# Altium schematic symbol library SnakeCardNative.SchLib: 29 symbols
Pins are listed as number, name and electrical type; pins without a type are passive.

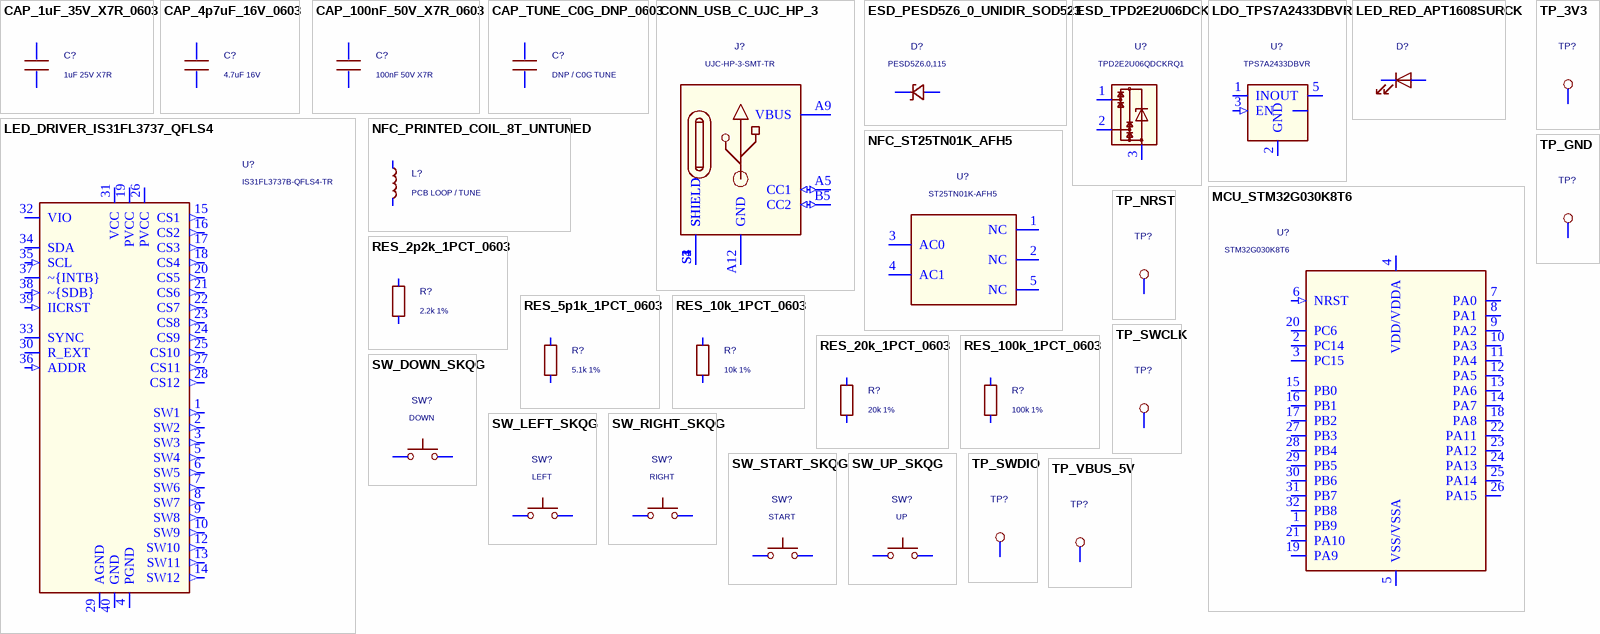
[diagram p0: symbols CAP_1uF_35V_X7R_0603 to TP_VBUS_5V]

## CAP_1uF_35V_X7R_0603
designator C?, comment 1uF 25V X7R
1 uF; 25 V; X7R; 0603; Manufacturer: Samsung Electro-Mechanics; Manufacturer_Part_Number: CL10B105KA8NNNC; Source_Footprint: Capacitor_SMD:C_0603_1608Metric; Assembly_Variant: SC-REVC-LCSC-P1; Assembly_Status: Prototype qualification pending; Fitted: Yes; Source_Datasheet: https://product.samsungsem.com/mlcc/CL10B105KA8NNN.do; Supplier: LCSC; Supplier_Part_Number: C29936; Datasheet: https://product.samsungsem.com/mlcc/CL10B105KA8NNN.do
footprint C_0603_1608Metric (Paid DIY board footprint; physical pads checked)
pins: 1, 2

## CAP_4p7uF_16V_0603
designator C?, comment 4.7uF 16V
4.7 uF; 16 V; 0603; ceramic; Manufacturer: Murata; Manufacturer_Part_Number: GRM188Z71C475KE21D; Source_Footprint: Capacitor_SMD:C_0603_1608Metric; Assembly_Variant: SC-REVC-LCSC-P1; Assembly_Status: Prototype qualification pending; Fitted: Yes; Source_Datasheet: https://search.murata.co.jp/Ceramy/image/img/A01X/G101/ENG/GRM188Z71C475KE21-01A.pdf; Supplier: LCSC; Supplier_Part_Number: C389010; Datasheet: https://search.murata.co.jp/Ceramy/image/img/A01X/G101/ENG/GRM188Z71C475KE21-01A.pdf
footprint C_0603_1608Metric (Paid DIY board footprint; physical pads checked)
pins: 1, 2

## CAP_100nF_50V_X7R_0603
designator C?, comment 100nF 50V X7R
100 nF; 50 V; X7R; 0603; Manufacturer: Yageo; Manufacturer_Part_Number: CC0603KRX7R9BB104; Source_Footprint: Capacitor_SMD:C_0603_1608Metric; Assembly_Variant: SC-REVC-LCSC-P1; Assembly_Status: Prototype qualification pending; Fitted: Yes; Source_Datasheet: https://yageogroup.com/download/specsheet/CC0603KRX7R9BB104; Supplier: LCSC; Supplier_Part_Number: C14663; Datasheet: https://yageogroup.com/download/specsheet/CC0603KRX7R9BB104
footprint C_0603_1608Metric (Paid DIY board footprint; physical pads checked)
pins: 1, 2

## CAP_TUNE_C0G_DNP_0603
designator C?, comment DNP / C0G TUNE
Source_Footprint: Capacitor_SMD:C_0603_1608Metric; Assembly: DNP; Assembly_Variant: SC-REVC-LCSC-P1; Assembly_Status: DNP pending RF tuning; Fitted: No; DNP_Reason: NFC tuning; no approved value
footprint C_0603_1608Metric__DNP_NOPASTE (Paid DIY board footprint; physical pads checked)
pins: 1, 2

## CONN_USB_C_UJC_HP_3
designator J?, comment UJC-HP-3-SMT-TR
USB-C power-only receptacle; 0.8 mm PCB; Manufacturer: Same Sky; Source_Footprint: SnakeCard:CUI_UJC-HP-3-SMT-TR; Assembly_Variant: SC-REVC-LCSC-P1; Assembly_Status: Prototype qualification pending; Fitted: Yes; Source_Datasheet: https://www.sameskydevices.com/product/resource/ujc-hp-3-smt-tr.pdf; Manufacturer_Part_Number: UJC-HP-3-SMT-TR; Supplier: LCSC; Supplier_Part_Number: C3198015; Datasheet: https://www.sameskydevices.com/product/resource/ujc-hp-3-smt-tr.pdf
footprint CUI_UJC-HP-3-SMT-TR (Paid DIY board footprint; physical pads checked)
pins: A5 CC1 (io), A9 VBUS, A12 GND, B5 CC2 (io), B9 VBUS, B12 GND, S1 SHIELD, S2 SHIELD, S3 SHIELD, S4 SHIELD

## ESD_PESD5Z6_0_UNIDIR_SOD523
designator D?, comment PESD5Z6.0,115
6 V unidirectional TVS; SOD523; Manufacturer: Nexperia; Source_Footprint: Diode_SMD:D_SOD-523; Assembly_Variant: SC-REVC-LCSC-P1; Assembly_Status: Prototype qualification pending; Fitted: Yes; Source_Datasheet: https://assets.nexperia.com/documents/data-sheet/PESD5Z6_0.pdf; Manufacturer_Part_Number: PESD5Z6.0,115; Supplier: LCSC; Supplier_Part_Number: C461166; Datasheet: https://assets.nexperia.com/documents/data-sheet/PESD5Z6_0.pdf
footprint D_SOD-523 (Paid DIY board footprint; physical pads checked)
pins: 1 K, 2 A

## ESD_TPD2E2U06DCK
designator U?, comment TPD2E2U06QDCKRQ1
Dual CC-line ESD protection; DCK SC70-3; Manufacturer: Texas Instruments; Source_Footprint: Package_TO_SOT_SMD:SOT-323_SC-70; Assembly_Variant: SC-REVC-LCSC-P1; Assembly_Status: Prototype qualification pending; Fitted: Yes; Source_Datasheet: https://www.ti.com/lit/ds/symlink/tpd2e2u06-q1.pdf; Manufacturer_Part_Number: TPD2E2U06QDCKRQ1; Supplier: LCSC; Supplier_Part_Number: C915089; Datasheet: https://www.ti.com/lit/ds/symlink/tpd2e2u06-q1.pdf
footprint SOT-323_SC-70 (Paid DIY board footprint; physical pads checked)
pins: 1, 2, 3

## LDO_TPS7A2433DBVR
designator U?, comment TPS7A2433DBVR
3.3 V LDO; DBV SOT-23-5; 18 V operating input; Manufacturer: Texas Instruments; Source_Footprint: Package_TO_SOT_SMD:SOT-23-5; Assembly_Variant: SC-REVC-LCSC-P1; Assembly_Status: Prototype qualification pending; Fitted: Yes; Source_Datasheet: https://www.ti.com/lit/ds/symlink/tps7a24.pdf; Manufacturer_Part_Number: TPS7A2433DBVR; Supplier: LCSC; Supplier_Part_Number: C2866134; Datasheet: https://www.ti.com/lit/ds/symlink/tps7a24.pdf
footprint SOT-23-5 (Paid DIY board footprint; physical pads checked)
pins: 1 IN (power), 2 GND (power), 3 EN (in), 4 NC, 5 OUT (power)

## LED_DRIVER_IS31FL3737_QFLS4
designator U?, comment IS31FL3737B-QFLS4-TR
LED matrix driver; QFN-40 with exposed GND pad; Manufacturer: Lumissil / ISSI; Source_Footprint: SnakeCard:IS31FL3737_QFN40_5x5mm_P0.4mm_EP3.4mm; Assembly_Variant: SC-REVC-LCSC-P1; Assembly_Status: Prototype qualification pending; Fitted: Yes; Source_Datasheet: https://www.lumissil.com/assets/pdf/core/IS31FL3737B_DS.pdf; Manufacturer_Part_Number: IS31FL3737B-QFLS4-TR; Supplier: LCSC; Supplier_Part_Number: C2940515; Datasheet: https://www.lumissil.com/assets/pdf/core/IS31FL3737B_DS.pdf
footprint IS31FL3737_QFN40_5x5mm_P0.4mm_EP3.4mm (Paid DIY board footprint; physical pads checked)
pins: 1 SW1 (out), 2 SW2 (out), 3 SW3 (out), 4 PGND (power), 5 SW4 (out), 6 SW5 (out), 7 SW6 (out), 8 SW7 (out), 9 SW8 (out), 10 SW9 (out), 11 PGND, 12 SW10 (out), 13 SW11 (out), 14 SW12 (out), 15 CS1 (out), 16 CS2 (out), 17 CS3 (out), 18 CS4 (out), 19 PVCC (power), 20 CS5 (out), 21 CS6 (out), 22 CS7 (out), 23 CS8 (out), 24 CS9 (out), 25 CS10 (out), 26 PVCC (power), 27 CS11 (out), 28 CS12 (out), 29 AGND (power), 30 R_EXT, 31 VCC (power), 32 VIO (power), 33 SYNC (io), 34 SDA (io), 35 SCL (in), 36 ADDR (in), 37 ~{INTB} (oc), 38 ~{SDB} (in), 39 IICRST (in), 40 GND (power), 41 GND

## LED_RED_APT1608SURCK
designator D?, comment KT-0603R  (value not drawn)
Red 1608 LED; Manufacturer: Hubei KENTO; Source_Footprint: SnakeCard:Kingbright_APT1608SURCK; Assembly_Variant: SC-REVC-LCSC-P1; Assembly_Status: Prototype qualification pending; Fitted: Yes; Source_Datasheet: https://datasheet.lcsc.com/datasheet/pdf/011ec3e8cb1e825f6961d29bc4db4c7a.pdf; Manufacturer_Part_Number: KT-0603R; Supplier: LCSC; Supplier_Part_Number: C2286; Datasheet: https://datasheet.lcsc.com/datasheet/pdf/011ec3e8cb1e825f6961d29bc4db4c7a.pdf
footprint Kingbright_APT1608SURCK (Paid DIY board footprint; physical pads checked)
pins: 1 K, 2 A

## MCU_STM32G030K8T6
designator U?, comment STM32G030K8T6
STM32G0 MCU; LQFP-32; Manufacturer: STMicroelectronics; Source_Footprint: Package_QFP:LQFP-32_7x7mm_P0.8mm; Assembly_Variant: SC-REVC-LCSC-P1; Assembly_Status: Prototype qualification pending; Fitted: Yes; Source_Datasheet: https://www.st.com/resource/en/datasheet/stm32g030k8.pdf; Manufacturer_Part_Number: STM32G030K8T6; Supplier: LCSC; Supplier_Part_Number: C431631; Datasheet: https://www.st.com/resource/en/datasheet/stm32g030k8.pdf
footprint LQFP-32_7x7mm_P0.8mm (Paid DIY board footprint; physical pads checked)
pins: 1 PB9 (io), 2 PC14 (io), 3 PC15 (io), 4 VDD/VDDA (power), 5 VSS/VSSA (power), 6 NRST (in), 7 PA0 (io), 8 PA1 (io), 9 PA2 (io), 10 PA3 (io), 11 PA4 (io), 12 PA5 (io), 13 PA6 (io), 14 PA7 (io), 15 PB0 (io), 16 PB1 (io), 17 PB2 (io), 18 PA8 (io), 19 PA9 (io), 20 PC6 (io), 21 PA10 (io), 22 PA11 (io), 23 PA12 (io), 24 PA13 (io), 25 PA14 (io), 26 PA15 (io), 27 PB3 (io), 28 PB4 (io), 29 PB5 (io), 30 PB6 (io), 31 PB7 (io), 32 PB8 (io)

## NFC_PRINTED_COIL_8T_UNTUNED
designator L?, comment PCB LOOP / TUNE  (net tie, no BOM)
Assembly_Variant: SC-REVC-LCSC-P1; Assembly_Status: PCB feature; no purchased component; Fitted: No; DNP_Reason: Printed PCB feature; no purchased component
footprint NFC_PRINTED_COIL_8T_UNTUNED (Paid DIY board footprint; physical pads checked)
pins: 1, 2

## NFC_ST25TN01K_AFH5
designator U?, comment ST25TN01K-AFH5
Passive NFC tag; UFDFPN5; Manufacturer: STMicroelectronics; Source_Footprint: SnakeCard:ST25TN01K_UFDFPN5_1.7x1.4mm; Assembly_Variant: SC-REVC-LCSC-P1; Assembly_Status: Prototype qualification pending; Fitted: Yes; Source_Datasheet: https://www.st.com/resource/en/datasheet/st25tn01k.pdf; Manufacturer_Part_Number: ST25TN01K-AFH5; Supplier: LCSC; Supplier_Part_Number: C3303589; Datasheet: https://www.st.com/resource/en/datasheet/st25tn01k.pdf
footprint ST25TN01K_UFDFPN5_1.7x1.4mm (Paid DIY board footprint; physical pads checked)
pins: 1 NC, 2 NC, 3 AC0, 4 AC1, 5 NC

## RES_2p2k_1PCT_0603
designator R?, comment 2.2k 1%
2.2 kohm; 1%; 0603; Manufacturer: Panasonic; Manufacturer_Part_Number: ERJ3EKF2201V; Source_Footprint: Resistor_SMD:R_0603_1608Metric; Assembly_Variant: SC-REVC-LCSC-P1; Assembly_Status: Prototype qualification pending; Fitted: Yes; Source_Datasheet: https://industrial.panasonic.com/cdbs/www-data/pdf/RDA0000/AOA0000C304.pdf; Supplier: LCSC; Supplier_Part_Number: C116387; Datasheet: https://industrial.panasonic.com/cdbs/www-data/pdf/RDA0000/AOA0000C304.pdf
footprint R_0603_1608Metric (Paid DIY board footprint; physical pads checked)
pins: 1, 2

## RES_5p1k_1PCT_0603
designator R?, comment 5.1k 1%
5.1 kohm; 1%; 0603; Manufacturer: Panasonic; Manufacturer_Part_Number: ERJ3EKF5101V; Source_Footprint: Resistor_SMD:R_0603_1608Metric; Assembly_Variant: SC-REVC-LCSC-P1; Assembly_Status: Prototype qualification pending; Fitted: Yes; Source_Datasheet: https://industrial.panasonic.com/cdbs/www-data/pdf/RDA0000/AOA0000C304.pdf; Supplier: LCSC; Supplier_Part_Number: C123727; Datasheet: https://industrial.panasonic.com/cdbs/www-data/pdf/RDA0000/AOA0000C304.pdf
footprint R_0603_1608Metric (Paid DIY board footprint; physical pads checked)
pins: 1, 2

## RES_10k_1PCT_0603
designator R?, comment 10k 1%
10 kohm; 1%; 0603; Manufacturer: Panasonic; Manufacturer_Part_Number: ERJ3EKF1002V; Source_Footprint: Resistor_SMD:R_0603_1608Metric; Assembly_Variant: SC-REVC-LCSC-P1; Assembly_Status: Prototype qualification pending; Fitted: Yes; Source_Datasheet: https://industrial.panasonic.com/cdbs/www-data/pdf/RDA0000/AOA0000C304.pdf; Supplier: LCSC; Supplier_Part_Number: C191124; Datasheet: https://industrial.panasonic.com/cdbs/www-data/pdf/RDA0000/AOA0000C304.pdf
footprint R_0603_1608Metric (Paid DIY board footprint; physical pads checked)
pins: 1, 2

## RES_20k_1PCT_0603
designator R?, comment 20k 1%
20 kohm; 1%; 0603; driver REXT; Manufacturer: Panasonic; Manufacturer_Part_Number: ERJ3EKF2002V; Source_Footprint: Resistor_SMD:R_0603_1608Metric; Assembly_Variant: SC-REVC-LCSC-P1; Assembly_Status: Prototype qualification pending; Fitted: Yes; Source_Datasheet: https://industrial.panasonic.com/cdbs/www-data/pdf/RDA0000/AOA0000C304.pdf; Supplier: LCSC; Supplier_Part_Number: C403057; Datasheet: https://industrial.panasonic.com/cdbs/www-data/pdf/RDA0000/AOA0000C304.pdf
footprint R_0603_1608Metric (Paid DIY board footprint; physical pads checked)
pins: 1, 2

## RES_100k_1PCT_0603
designator R?, comment 100k 1%
100 kohm; 1%; 0603; Manufacturer: UNI-ROYAL; Manufacturer_Part_Number: 0603WAF1003T5E; Source_Footprint: Resistor_SMD:R_0603_1608Metric; Assembly_Variant: SC-REVC-LCSC-P1; Assembly_Status: Prototype qualification pending; Fitted: Yes; Source_Datasheet: https://datasheet.lcsc.com/datasheet/pdf/0a975aaa49b7c97f38a963127be4a823.pdf; Supplier: LCSC; Supplier_Part_Number: C25803; Datasheet: https://datasheet.lcsc.com/datasheet/pdf/0a975aaa49b7c97f38a963127be4a823.pdf
footprint R_0603_1608Metric (Paid DIY board footprint; physical pads checked)
pins: 1, 2

## SW_DOWN_SKQG
designator SW?, comment DOWN
Tactile switch; manual solder after reflow; Manufacturer: Alps Alpine; Manufacturer_Part_Number: SKQGABE010; Source_Footprint: Button_Switch_SMD:SW_SPST_SKQG_WithStem; Assembly_Variant: SC-REVC-LCSC-P1; Assembly_Status: Prototype qualification pending; Fitted: Yes; Source_Datasheet: https://tech.alpsalpine.com/cms.media/SKQGAB_KQG_719_EN_cc4e10226e.pdf; Supplier: LCSC; Supplier_Part_Number: C115351; Datasheet: https://tech.alpsalpine.com/cms.media/SKQGAB_KQG_719_EN_cc4e10226e.pdf
footprint SW_SPST_SKQG_WithStem__HAND_SOLDER_NOPASTE (Paid DIY board footprint; physical pads checked)
pins: 1, 2

## SW_LEFT_SKQG
designator SW?, comment LEFT
Tactile switch; manual solder after reflow; Manufacturer: Alps Alpine; Manufacturer_Part_Number: SKQGABE010; Source_Footprint: Button_Switch_SMD:SW_SPST_SKQG_WithStem; Assembly_Variant: SC-REVC-LCSC-P1; Assembly_Status: Prototype qualification pending; Fitted: Yes; Source_Datasheet: https://tech.alpsalpine.com/cms.media/SKQGAB_KQG_719_EN_cc4e10226e.pdf; Supplier: LCSC; Supplier_Part_Number: C115351; Datasheet: https://tech.alpsalpine.com/cms.media/SKQGAB_KQG_719_EN_cc4e10226e.pdf
footprint SW_SPST_SKQG_WithStem__HAND_SOLDER_NOPASTE (Paid DIY board footprint; physical pads checked)
pins: 1, 2

## SW_RIGHT_SKQG
designator SW?, comment RIGHT
Tactile switch; manual solder after reflow; Manufacturer: Alps Alpine; Manufacturer_Part_Number: SKQGABE010; Source_Footprint: Button_Switch_SMD:SW_SPST_SKQG_WithStem; Assembly_Variant: SC-REVC-LCSC-P1; Assembly_Status: Prototype qualification pending; Fitted: Yes; Source_Datasheet: https://tech.alpsalpine.com/cms.media/SKQGAB_KQG_719_EN_cc4e10226e.pdf; Supplier: LCSC; Supplier_Part_Number: C115351; Datasheet: https://tech.alpsalpine.com/cms.media/SKQGAB_KQG_719_EN_cc4e10226e.pdf
footprint SW_SPST_SKQG_WithStem__HAND_SOLDER_NOPASTE (Paid DIY board footprint; physical pads checked)
pins: 1, 2

## SW_START_SKQG
designator SW?, comment START
Tactile switch; manual solder after reflow; Manufacturer: Alps Alpine; Manufacturer_Part_Number: SKQGABE010; Source_Footprint: Button_Switch_SMD:SW_SPST_SKQG_WithStem; Assembly_Variant: SC-REVC-LCSC-P1; Assembly_Status: Prototype qualification pending; Fitted: Yes; Source_Datasheet: https://tech.alpsalpine.com/cms.media/SKQGAB_KQG_719_EN_cc4e10226e.pdf; Supplier: LCSC; Supplier_Part_Number: C115351; Datasheet: https://tech.alpsalpine.com/cms.media/SKQGAB_KQG_719_EN_cc4e10226e.pdf
footprint SW_SPST_SKQG_WithStem__HAND_SOLDER_NOPASTE (Paid DIY board footprint; physical pads checked)
pins: 1, 2

## SW_UP_SKQG
designator SW?, comment UP
Tactile switch; manual solder after reflow; Manufacturer: Alps Alpine; Manufacturer_Part_Number: SKQGABE010; Source_Footprint: Button_Switch_SMD:SW_SPST_SKQG_WithStem; Assembly_Variant: SC-REVC-LCSC-P1; Assembly_Status: Prototype qualification pending; Fitted: Yes; Source_Datasheet: https://tech.alpsalpine.com/cms.media/SKQGAB_KQG_719_EN_cc4e10226e.pdf; Supplier: LCSC; Supplier_Part_Number: C115351; Datasheet: https://tech.alpsalpine.com/cms.media/SKQGAB_KQG_719_EN_cc4e10226e.pdf
footprint SW_SPST_SKQG_WithStem__HAND_SOLDER_NOPASTE (Paid DIY board footprint; physical pads checked)
pins: 1, 2

## TP_3V3
designator TP?, comment +3V3  (value not drawn)
Source_Footprint: TestPoint:TestPoint_Pad_D1.0mm; Assembly_Variant: SC-REVC-LCSC-P1; Assembly_Status: PCB feature; no purchased component; Fitted: No; DNP_Reason: Printed PCB feature; no purchased component
footprint TestPoint_Pad_D1.0mm (Paid DIY board footprint; physical pads checked)
pins: 1

## TP_GND
designator TP?, comment GND  (value not drawn)
Source_Footprint: TestPoint:TestPoint_Pad_D1.0mm; Assembly_Variant: SC-REVC-LCSC-P1; Assembly_Status: PCB feature; no purchased component; Fitted: No; DNP_Reason: Printed PCB feature; no purchased component
footprint TestPoint_Pad_D1.0mm (Paid DIY board footprint; physical pads checked)
pins: 1

## TP_NRST
designator TP?, comment NRST  (value not drawn)
Source_Footprint: TestPoint:TestPoint_Pad_D1.0mm; Assembly_Variant: SC-REVC-LCSC-P1; Assembly_Status: PCB feature; no purchased component; Fitted: No; DNP_Reason: Printed PCB feature; no purchased component
footprint TestPoint_Pad_D1.0mm (Paid DIY board footprint; physical pads checked)
pins: 1

## TP_SWCLK
designator TP?, comment SWCLK  (value not drawn)
Source_Footprint: TestPoint:TestPoint_Pad_D1.0mm; Assembly_Variant: SC-REVC-LCSC-P1; Assembly_Status: PCB feature; no purchased component; Fitted: No; DNP_Reason: Printed PCB feature; no purchased component
footprint TestPoint_Pad_D1.0mm (Paid DIY board footprint; physical pads checked)
pins: 1

## TP_SWDIO
designator TP?, comment SWDIO  (value not drawn)
Source_Footprint: TestPoint:TestPoint_Pad_D1.0mm; Assembly_Variant: SC-REVC-LCSC-P1; Assembly_Status: PCB feature; no purchased component; Fitted: No; DNP_Reason: Printed PCB feature; no purchased component
footprint TestPoint_Pad_D1.0mm (Paid DIY board footprint; physical pads checked)
pins: 1

## TP_VBUS_5V
designator TP?, comment VBUS_5V  (value not drawn)
Source_Footprint: TestPoint:TestPoint_Pad_D1.0mm; Assembly_Variant: SC-REVC-LCSC-P1; Assembly_Status: PCB feature; no purchased component; Fitted: No; DNP_Reason: Printed PCB feature; no purchased component
footprint TestPoint_Pad_D1.0mm (Paid DIY board footprint; physical pads checked)
pins: 1